# Altium schematic symbol library ERA6AEB203V.SchLib: 1 symbol
Pins are listed as number, name and electrical type; pins without a type are passive.

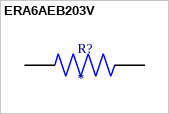
[diagram p0: symbol ERA6AEB203V]

## ERA6AEB203V
designator R?
RES SMD 20K OHM 0.1% 1/8W 0805; MP: ERA6AEB203V; Availability: Unavailable; Price: None; Package: None; Value: *; ComponentLink1Description: Digikey link; ComponentLink1URL: https://www.digikey.com/en/products/detail/panasonic-industry/ERA-6AEB203V/1465780?_gl=1*16ggu6x*_up*MQ..*_gs*MQ..&gclid=CjwKCAjw6f3RBhApEiwAMaCqWWAys7UYOKri6355z56lT8wD9j8kH64REZKYwhM8W5opH-dHb2-LKxoC2UMQAvD_BwE&gclsrc=aw.ds&gbraid=0AAAAADrbLliUt3fRxN84rEH66mf2IHcf7
footprint RES_ERA6AEB203V
pins: 1, 2